# Altium schematic symbol library 无线充电.SchLib: 19 symbols
Pins are listed as number, name and electrical type; pins without a type are passive.

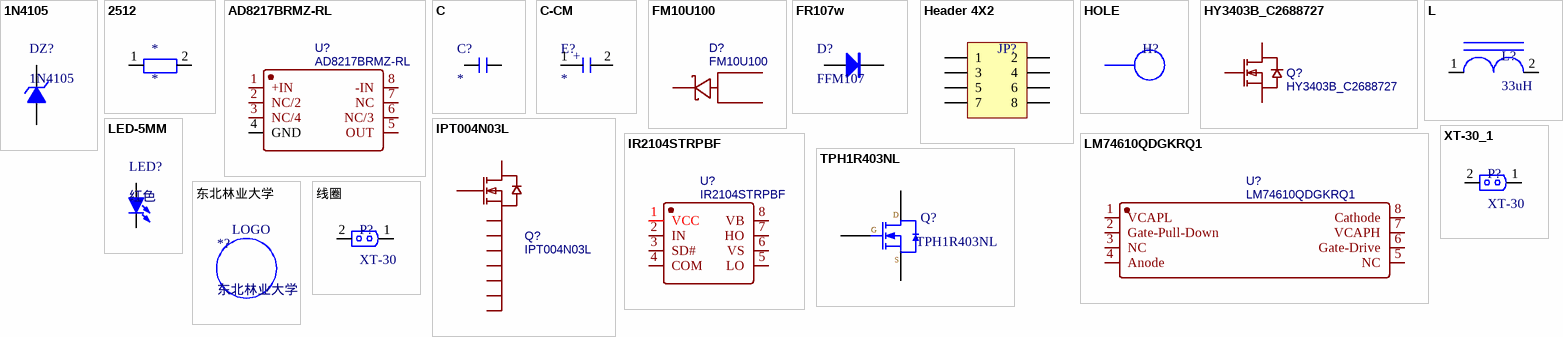
[diagram p0: symbols 1N4105 to 线圈]

## 1N4105
designator DZ?
11V/0.5W稳压管; 版权归属: 源创客; BOM名称: 11V/0.5W稳压管; 学习资源: www.ooocke.com
footprint DO-35 (1.8*6.8mm(直径，脚距）)
footprint DO-213AA (1.5*3.5mm(直径，脚距）)
footprint DO-35V (1.8*2.5mm(直径，脚距）)
footprint SOD-123 (2.7x1.6X1.1mm（长宽高，不包括引脚）)
pins: 1 A, 2 K

## 2512
designator *
footprint R 2512_M (1W贴片电阻)
pins: 1, 2

## AD8217BRMZ-RL
designator U?
BOM_Manufacturer: Analog Devices; Contributor: LCSC; BOM_Supplier: LCSC; BOM_Supplier Part: C652512; BOM_Manufacturer Part: AD8217BRMZ-RL; BOM_JLCPCB Part Class: Extended Part; spicePre: U; spiceSymbolName: AD8217BRMZ-RL
footprint MSOP-8_L3.0-W3.0-P0.65-LS4.9-BL
pins: 1 +IN, 2 NC/2, 3 NC/4, 4 GND, 5 OUT, 6 NC/3, 7 NC, 8 -IN

## C
designator C?
无极性贴片电容; 版权归属: 源创客; 材质: X7R; BOM名称: 无极性贴片电容; 学习资源: www.ooocke.com
footprint C 1210_L (无极性贴片电容)
pins: 1, 2

## C-CM
designator E?
贴片电解电容; 版权归属: 源创客; BOM名称: 贴片电解电容; 学习资源: www.ooocke.com
footprint CM G(12.5*13.5) (贴片电解电容，直径12.5mm，高13.5mm)
footprint CM H(16*16.5) (贴片电解电容，直径16mm，高16.5mm)
footprint CM F(10*10.2) (贴片电解电容，直径10mm，高10.2mm)
footprint CAP 5.0*10*12.5 (脚距5mm直径10mm高度12.5mm)
pins: 1, 2
text: +

## FM10U100
designator D?
BOM_Manufacturer: Formosa Microsemi; Contributor: LCSC; BOM_Supplier: LCSC; BOM_Supplier Part: C376165; BOM_Manufacturer Part: FM10U100; BOM_JLCPCB Part Class: Extended Part; spicePre: D; spiceSymbolName: FM10U100
footprint TO-277B_3P-L6.1-W4.3-LS7.0-TR
pins: 1 A, 2 C, 3 A

## FR107w
designator D?, comment FFM107
快恢复整流二极管; BOM名称: 快恢复二极管; 版权归属: 源创客; 学习资源: www.ooocke.com
footprint SOD-123 (2.7x1.6X1.1mm（长宽高，不包括引脚）)
pins: 1 A, 2 K

## Header 4X2
designator JP?  (value not drawn)
4*2P接插件; 版权归属: 源创客; BOM名称: 4*2P接插件; 学习资源: www.ooocke.com
footprint CONN-TH_A2006WV-2X4P
pins: 1, 2, 3, 4, 5, 6, 7, 8

## HOLE
designator H?
固定孔
footprint LQ_SCROW3&5MM

## HY3403B_C2688727
designator Q?
BOM_Manufacturer: HUAYI(华羿微); Contributor: LCSC; BOM_Supplier: LCSC; BOM_Supplier Part: C2688727; BOM_Manufacturer Part: HY3403B; BOM_JLCPCB Part Class: Extended Part; spicePre: Q; spiceSymbolName: HY3403B_C2688727
footprint TO-263-2_L10.1-W9.1-P5.08-LS15.2-BR
pins: 1 G, 2 D, 3 S

## IPT004N03L
designator Q?
BOM_Manufacturer: Infineon Technologies; Contributor: LCSC; BOM_Supplier: LCSC; BOM_Supplier Part: C531197; BOM_Manufacturer Part: IPT004N03L; BOM_JLCPCB Part Class: Extended Part; spicePre: Q; spiceSymbolName: IPT004N03L
footprint PG-HSOF-8-1_L10.4-W9.9-P1.2-LS11.7-TL
pins: 1 G, 2 S, 3 S, 4 S, 5 S, 6 S, 7 S, 8 S, 9 D

## IR2104STRPBF
designator U?
BOM_Manufacturer: IR; spicePre: X; BOM_Supplier: LCSC; BOM_Manufacturer Part: IR2104STRPBF; BOM_Supplier Part: C2960; BOM_JLCPCB Part Class: Extended Part; spiceSymbolName: IR2104STRPBF
footprint SOIC-8_L4.9-W3.9-P1.27-LS6.0-BL
pins: 1 VCC, 2 IN, 3 SD#, 4 COM, 5 LO, 6 VS, 7 HO, 8 VB

## L
designator L?, comment 33uH
一体化成型电感
footprint IND-SMD_L17.5-W17.2
footprint CDRH127 (12*12*8mm（长宽高）)
pins: 1, 2

## LED-5MM
designator LED?, comment 红色
0805LED; BOM名称: 5mm插件LED; 版权归属: 源创客; 学习资源: www.ooocke.com
footprint LED 0805B (蓝色0805LED)
pins: 1 A, 2 K

## LM74610QDGKRQ1
designator U?
BOM_Manufacturer: TI(德州仪器); Contributor: lcsc; BOM_Supplier: LCSC; BOM_Supplier Part: C2649431; BOM_Manufacturer Part: LM74610QDGKRQ1; link: https://atta.szlcsc.comnull; spicePre: U; spiceSymbolName: LM74610QDGKRQ1
footprint VSSOP-8_L3.0-W3.0-P0.65-LS5.0-BL
pins: 1 VCAPL, 2 Gate-Pull-Down, 3 NC, 4 Anode, 5 NC, 6 Gate-Drive, 7 VCAPH, 8 Cathode

## TPH1R403NL
designator Q?
Package: SOT-23-6; Supplier: LC; SuppliersPartNumber: C32254
footprint SOP Advance
pins: 1 S, 2 D, 3 G

## XT-30_1
designator P?, comment XT-30
接口
footprint xt-30 - duplicate (长：16mm，宽：8.2mm，高：16mm)
pins: 1, 2

## 东北林业大学
designator *?
footprint 校徽300mil (Footprint not found)
text: LOGO

## 线圈
designator P?, comment XT-30
接口
footprint 线圈
pins: 1, 2